# Altium schematic symbol library TitansLib.SchLib: 462 symbols (part 8 of 24)
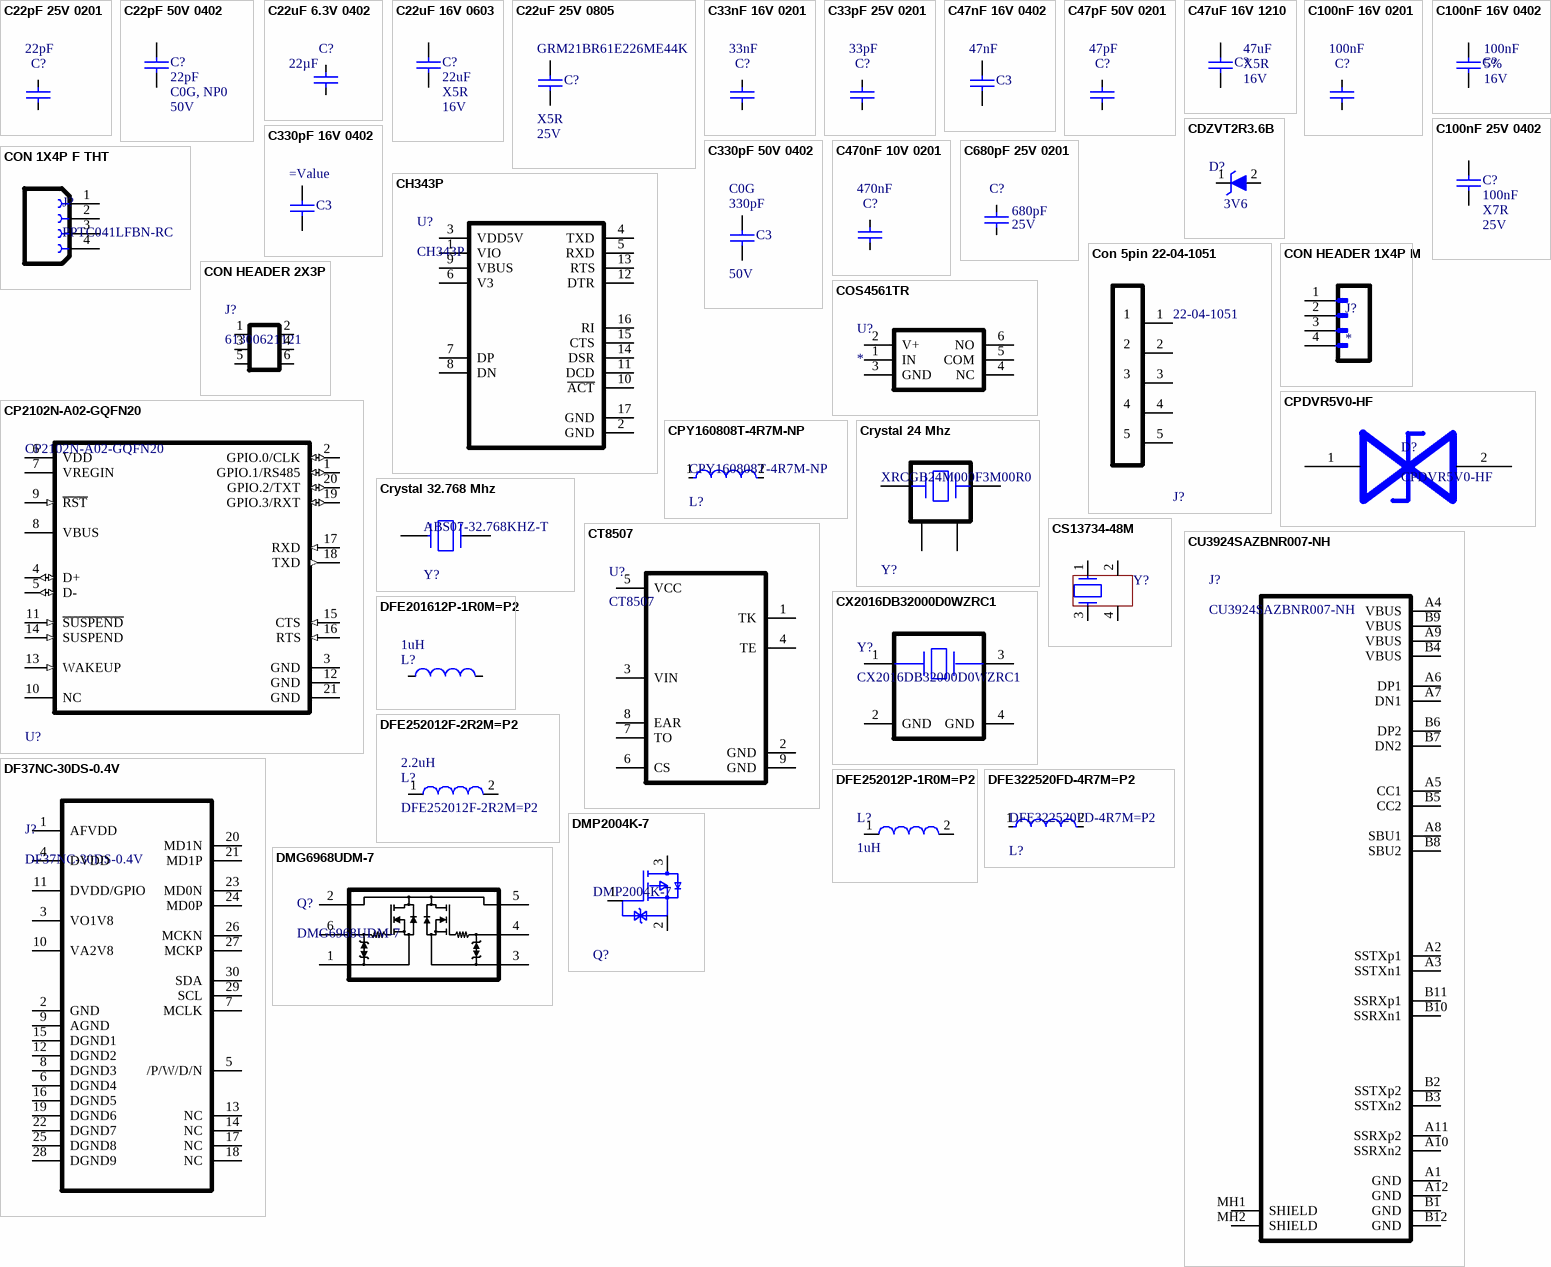
[diagram p24: symbols C22pF 25V 0201 to DMP2004K-7]

## Con 5pin 22-04-1051
designator J?, comment 22-04-1051
Pin Header, Wire-to-Board, 2.5 mm, 1 Rows, 5 Contacts, Through Hole Straight, KK 5045 Series; Manufacturer Lifecycle Status: ACTIVE; NexarPartId: 247488; Manufacturer: Molex; Insulation Resistance: 1GΩ; Current Rating: 3A; Pitch: 2.5mm; Glow Wire Compliant: Non-compliant; Plating: Tin; Number of Circuits: 5; Voltage Rating: 250V; Contact Resistance: 20mΩ; Gender: Male; Connector Type: Male Pin; Max Voltage Rating (DC): 250.25kV; Dielectric Material: Polyamide; Operating Force: 58.84N; Plating Thickness: 5.08µm; Termination: Solder; Number of Rows: 1; REACH SVHC: Unknown; Number of Pins: 5; Length: 12mm; Schedule B: 8536694040|8536694040|8536694040|8536694040|8536694040|8536694040|8536694040|8536694040|8536694040|8536694040|8536694040|8536694040|8536694040|8536694040|8536694040|8536694040|8536694040|8536694040|8536694040|8536694040|8536694040|8536694040|8536694040|85; Min Operating Temperature: -40°C; RoHS: Compliant; Radiation Hardening: No; Contact Mating Length: 7.493mm; Packaging: Bulk; Halogen Free: Low Halogen; Housing Color: Natural; Max Operating Temperature: 105°C; Housing Material: Nylon; Lead Pitch: 2.5mm; Max Voltage Rating (AC): 250V; Number of Positions: 5; Material: Nylon; Contact Plating: Tin; Depth: 4.9mm; Flammability Rating: UL94 V-0; Lead Free: Lead Free; Fastening Type: Friction; Color: Natural; Orientation: Vertical; Lifecycle Status: Production; Number of Contacts: 5; Voltage Rating (DC): 250V; Voltage Rating (AC): 250V; Country of Origin: TW; Contact Material: Brass; Mount: Through Hole; Supplier: Arrow Electronics; Supplier Part Number: 0022041051; Manufacturer Part Number: 22-04-1051; Category: Headers and Wire Housings; Stock: 12494; Pricing: 1=1,0245, 10=0,8607, 100=0,7266, 500=0,6432, 1000=0,6067, 8000=0,5196 (USD); China RoHS: Compliant; Export Control Classification Number (ECCN) Code: EAR99; Harmonized Tariff Schedule (HTS) Code: 8536.69.40.40; Introduction Date: 1994-12-01; Mounting Technology: Through Hole; Pins: 5; Terminal Pitch: 2.4892mm; ComponentLink1URL: https://datasheet.octopart.com:443/22041051-Molex-datasheet-152766370.pdf?src-supplier=IHS; ComponentLink1Description: https://datasheet.octopart.com:443/22041051-Molex-datasheet-152766370.pdf?src-supplier=IHS; ComponentLink2URL: https://datasheet.octopart.com:443/22-04-1051-Molex-datasheet-126588.pdf?src-supplier=Factory+Futures; ComponentLink2Description: https://datasheet.octopart.com:443/22-04-1051-Molex-datasheet-126588.pdf?src-supplier=Factory+Futures; ComponentLink3URL: https://sigma.octopart.com:443/16295337/technical_drawing/Molex-22-04-1051.pdf?src-supplier=Molex; ComponentLink3Description: https://sigma.octopart.com:443/16295337/technical_drawing/Molex-22-04-1051.pdf?src-supplier=Molex; ComponentLink4URL: https://datasheet.octopart.com:443/22-04-1051-Molex-datasheet-13787172.pdf?src-supplier=Molex; ComponentLink4Description: https://datasheet.octopart.com:443/22-04-1051-Molex-datasheet-13787172.pdf?src-supplier=Molex; ComponentLink5URL: https://datasheet.octopart.com:443/22-04-1051-Molex-datasheet-193084691.pdf?src-supplier=JRH+Electronics; ComponentLink5Description: https://datasheet.octopart.com:443/22-04-1051-Molex-datasheet-193084691.pdf?src-supplier=JRH+Electronics; ComponentLink6URL: https://datasheet.octopart.com:443/22-04-1051-Molex-datasheet-154746825.pdf?src-supplier=Master+Electronics; ComponentLink6Description: https://datasheet.octopart.com:443/22-04-1051-Molex-datasheet-154746825.pdf?src-supplier=Master+Electronics; ComponentLink7URL: https://datasheet.octopart.com:443/22-04-1051-Molex-datasheet-23708870.pdf?src-supplier=Newark; ComponentLink7Description: https://datasheet.octopart.com:443/22-04-1051-Molex-datasheet-23708870.pdf?src-supplier=Newark; ComponentLink8URL: https://datasheet.octopart.com:443/22-04-1051-Molex-datasheet-82994734.pdf?src-supplier=Newark; ComponentLink8Description: https://datasheet.octopart.com:443/22-04-1051-Molex-datasheet-82994734.pdf?src-supplier=Newark; ComponentLink9URL: https://datasheet.octopart.com:443/22-04-1051-Molex-datasheet-140180718.pdf?src-supplier=RS+(Formerly+Allied+Electronics); ComponentLink9Description: https://datasheet.octopart.com:443/22-04-1051-Molex-datasheet-140180718.pdf?src-supplier=RS+(Formerly+Allied+Electronics); ComponentLink10URL: https://datasheet.octopart.com:443/22-04-1051-Molex-datasheet-120144843.pdf?src-supplier=RS+(Formerly+Allied+Electronics); ComponentLink10Description: https://datasheet.octopart.com:443/22-04-1051-Molex-datasheet-120144843.pdf?src-supplier=RS+(Formerly+Allied+Electronics); ComponentLink11URL: https://datasheet.octopart.com:443/22-04-1051-Molex-datasheet-44401622.pdf?src-supplier=Electro+Sonic; ComponentLink11Description: https://datasheet.octopart.com:443/22-04-1051-Molex-datasheet-44401622.pdf?src-supplier=Electro+Sonic; ComponentLink12URL: https://datasheet.octopart.com:443/22-04-1051-Molex-datasheet-37168631.pdf?src-supplier=Electro+Sonic; ComponentLink12Description: https://datasheet.octopart.com:443/22-04-1051-Molex-datasheet-37168631.pdf?src-supplier=Electro+Sonic; ComponentLink13URL: https://datasheet.octopart.com:443/22-04-1051-Molex-datasheet-15766282.pdf?src-supplier=Farnell; ComponentLink13Description: https://datasheet.octopart.com:443/22-04-1051-Molex-datasheet-15766282.pdf?src-supplier=Farnell; ComponentLink14URL: https://datasheet.octopart.com:443/22-04-1051-Molex-datasheet-13550724.pdf?src-supplier=Farnell; ComponentLink14Description: https://datasheet.octopart.com:443/22-04-1051-Molex-datasheet-13550724.pdf?src-supplier=Farnell; ComponentLink15URL: https://datasheet.octopart.com:443/22-04-1051-Molex-datasheet-11031693.pdf?src-supplier=Farnell; ComponentLink15Description: https://datasheet.octopart.com:443/22-04-1051-Molex-datasheet-11031693.pdf?src-supplier=Farnell; ComponentLink16URL: https://datasheet.octopart.com:443/22-04-1051-Molex-datasheet-561885.pdf?src-supplier=Farnell; ComponentLink16Description: https://datasheet.octopart.com:443/22-04-1051-Molex-datasheet-561885.pdf?src-supplier=Farnell; ComponentLink17URL: http://sigma.octopart.com:80/16295340/rohs_statement/Molex-22-04-1051.pdf?src-supplier=Compliance+Statements; ComponentLink17Description: http://sigma.octopart.com:80/16295340/rohs_statement/Molex-22-04-1051.pdf?src-supplier=Compliance+Statements; ComponentLink18URL: http://sigma.octopart.com:80/reach_statement/Molex-company-74.pdf?src-supplier=Compliance+Statements; ComponentLink18Description: http://sigma.octopart.com:80/reach_statement/Molex-company-74.pdf?src-supplier=Compliance+Statements; ComponentLink19URL: http://sigma.octopart.com:80/rohs_statement/Molex-company-73.pdf?src-supplier=Compliance+Statements; ComponentLink19Description: http://sigma.octopart.com:80/rohs_statement/Molex-company-73.pdf?src-supplier=Compliance+Statements; ComponentLink20URL: http://sigma.octopart.com:80/conflict_mineral_statement/Molex-company-72.pdf?src-supplier=Compliance+Statements; ComponentLink20Description: http://sigma.octopart.com:80/conflict_mineral_statement/Molex-company-72.pdf?src-supplier=Compliance+Statements; Supplier 1: DigiKey; Supplier Part Number 1: WM18788-ND; Supplier 2: Mouser; Supplier Part Number 2: 538-22-04-1051
footprint FP-22-04-1051-MFG
pins: 1, 2, 3, 4, 5

## CON HEADER 1X4P M
designator J?
Connector Header Through Hole 4 position 0.100 (2.54mm); MF: WÃ¼rth Elektronik; MP: 61300411121; SnapEDA_Link: https://www.snapeda.com/parts/61300411121/W%25C3%25BCrth+Elektronik+Midcom/view-part/?ref=snap; Package: None; Value: *; Check_prices: https://www.snapeda.com/parts/61300411121/W%25C3%25BCrth+Elektronik+Midcom/view-part/?ref=eda
footprint WURTH_61300411121
pins: 1, 2, 3, 4

## CON HEADER 2X3P
designator J?, comment 61300621121
Header, 2.54Mm, Pin, Tht, Vertical, 6Way; |Würth Elektronik 61300621121; Manufacturer: Wurth Elektronik; Manufacturer Lifecycle Status: ACTIVE; MF: {'manufacturer': u'Wurth Elektronik'}; Connector Type: Male Pin; Contact Resistance: 20mΩ; Current Rating: 3A; Gender: Male; Insulation Resistance: 1GΩ; Number of Contacts: 6; Operating Supply Voltage: 250V; YEOL: 1 = Estimated lifetime > 10 years; Package: None; Price: None; Value: *; MP: 61300621121; Availability: Unavailable; Supplier: Newark; Supplier Part Number: 61300621121; Manufacturer Part Number: 61300621121; RoHS: Compliant; Category: Headers and Wire Housings; Stock: 16511; Pricing: 1=0,641, 10=0,56, 25=0,533, 50=0,498, 100=0,478, 500=0,45, 1000=0,418, 5000=0,385 (USD); Color: Black; Contact Material: Gold; Contact Mating Length: 5.9944mm; Contact Plating: Gold; Height: 8.89mm; Lead Pitch: 2.54mm; Length: 7.62mm; Lifecycle Status: Production; Max Operating Temperature: 105°C; Min Operating Temperature: -40°C; Mounting Technology: Through Hole; Pins: 6; Number of Positions: 6; Number of Rows: 2; Orientation: Vertical; Packaging: Bulk; Pitch: 2.54mm; Row Spacing: 2.54mm; Termination: Solder; Voltage Rating: 250V; ComponentLink1URL: https://datasheet.octopart.com:443/61300621121-W%C3%BCrth-Elektronik-datasheet-149524079.pdf?src-supplier=Wurth+Elektronik; ComponentLink1Description: https://datasheet.octopart.com:443/61300621121-W%C3%BCrth-Elektronik-datasheet-149524079.pdf?src-supplier=Wurth+Elektronik; ComponentLink2URL: https://datasheet.octopart.com:443/61300621121-W%C3%BCrth-Elektronik-datasheet-45185731.pdf?src-supplier=HQonline; ComponentLink2Description: https://datasheet.octopart.com:443/61300621121-W%C3%BCrth-Elektronik-datasheet-45185731.pdf?src-supplier=HQonline; ComponentLink3URL: https://datasheet.octopart.com:443/61300621121-W%C3%BCrth-Elektronik-datasheet-10693404.pdf?src-supplier=Newark; ComponentLink3Description: https://datasheet.octopart.com:443/61300621121-W%C3%BCrth-Elektronik-datasheet-10693404.pdf?src-supplier=Newark
footprint 61300621121
pins: 1, 2, 3, 4, 5, 6

## COS4561TR
designator U?
3V~16V 1 3.6Ω SOT-23-6 Analog Switches, Multiplexers, Demultiplexers RoHS; Manufacturer 1: Cosine; Manufacturer Part Number 1: COS4561TR; Datasheet Link: https://www.lcsc.com/datasheet/C3035952.pdf; Height: 1.45mm; Supplier Part Number 1: C3035952; Supplier Link 1: https://www.lcsc.com/product-detail/C3035952.html?s_z=n_COS4561; Supplier Unit Price 1: 0.5675
footprint SOT95P280X145-6N
pins: 1 IN, 2 V+, 3 GND, 4 NC, 5 COM, 6 NO

## CP2102N-A02-GQFN20
designator U?
USB Bus Controller, CMOS; Manufacturer: Silicon Labs; Manufacturer Part Number: CP2102N-A02-GQFN20; Supplier: Mouser; Supplier Part Number: 634-CP2102NA02GQFN20; RoHS: Yes; Category: USB Interface ICs; Stock: 69421; Pricing: 1=3.96, 10=3.54, 50=2.82, 100=2.69, 1000=2.16, 10000=2.08 (USD); ComponentLink1URL: https://datasheet.ciiva.com:443/pdfs/VipMasterIC/IC/SILC/SILC-S-A0007770867/SILC-S-A0007770867-1.pdf?src-supplier=IHS+Markit; ComponentLink1Description: https://datasheet.ciiva.com:443/pdfs/VipMasterIC/IC/SILC/SILC-S-A0007770867/SILC-S-A0007770867-1.pdf?src-supplier=IHS+Markit; ComponentLink2URL: http://www.farnell.com/datasheets/2786351.pdf?src-supplier=Farnell; ComponentLink2Description: http://www.farnell.com/datasheets/2786351.pdf?src-supplier=Farnell; ComponentLink3URL: https://www.silabs.com/documents/public/data-sheets/cp2102n-datasheet.pdf?src-supplier=Digikey; ComponentLink3Description: https://www.silabs.com/documents/public/data-sheets/cp2102n-datasheet.pdf?src-supplier=Digikey; ComponentLink4URL: http://www.farnell.com/datasheets/2786351.pdf?src-supplier=Newark; ComponentLink4Description: http://www.farnell.com/datasheets/2786351.pdf?src-supplier=Newark
footprint CP2102N-A02-GQFN20-MFG
pins: 1 GPIO.1/RS485 (io), 2 GPIO.0/CLK (io), 3 GND (power), 4 D+ (io), 5 D- (io), 6 VDD (power), 7 VREGIN (power), 8 VBUS (power), 9 ~{RST} (in), 10 NC, 11 ~{SUSPEND} (in), 12 GND (power), 13 WAKEUP (in), 14 SUSPEND (in), 15 CTS (in), 16 RTS (in), 17 RXD (in), 18 TXD (out), 19 GPIO.3/RXT (io), 20 GPIO.2/TXT (io), 21 GND (power)

## CPDVR5V0-HF
designator D?
footprint CPDVR5V0-HF (Chip Diode, 2-Leads, Body 1,00x0,60mm, IPC Medium Density)
pins: 1, 2

## CPY160808T-4R7M-NP
designator L?
800mA 4.7uH 250mΩ Multilayer inductor ±20% 0603 Fixed Inductors RoHS; Manufacturer: Chilisin; Supplier: LCSC; Supplier Part Number: C295681; Manufacturer Part Number: CPY160808T-4R7M-NP; RoHS: Yes; Category: Fixed Inductors; Supplier Unit Price 1: 0.0194; ComponentLink1URL: https://datasheet.ciiva.com:443/pdfs/VipMasterIC/IC/MURE/MURE-S-A0006520090/MURE-S-A0006740961-1.pdf?src-supplier=IHS+Markit; ComponentLink1Description: https://datasheet.ciiva.com:443/pdfs/VipMasterIC/IC/MURE/MURE-S-A0006520090/MURE-S-A0006740961-1.pdf?src-supplier=IHS+Markit
footprint RES0603-M (Chip Resistor, 2-Leads, Body 1.60x0.80mm, IPC Medium Density)
pins: 1, 2

## Crystal 24 Mhz
designator Y?, comment XRCGB24M000F3M00R0
Crystal, Quartz, 24 MHz, SMD, 2mm x 1.6mm x 0.65mm, 40 ppm, 6 pF, 30 ppm, XRCGB_F_M; Manufacturer: Murata; ESR (Equivalent Series Resistance): 150R; Operating Frequency: 24 MHz; Tolerance: 30ppm; Frequency: 24MHz; Load Capacitance: 6pF; Frequency Stability: 40ppm; ESR: 150Ω; Length: 2mm; Height: 0.028inch; Lead Free: Lead Free; Min Operating Temperature: -30°C; REACH SVHC: No SVHC; RoHS Compliant: Yes; Series Resistance: 150R; Mount: Surface Mount; Packaging: Tape and Reel; Termination: SMD/SMT; Case/Package: SMD/SMT; Max Operating Temperature: 85°C; Width: 1.6mm; Number of Pins: 4; Package Quantity: 1; Depth: 1.6mm; Frequency Tolerance: 30ppm; Series: XRCGB; Supplier: Future Electronics; Supplier Part Number: XRCGB24M000F3M00R0; Manufacturer Part Number: XRCGB24M000F3M00R0; RoHS: Compliant; Category: Crystals; Stock: 3000; Pricing: 3000=0,132 (USD); Country of Origin: Japan; Export Control Classification Number (ECCN) Code: EAR99; Harmonized Tariff Schedule (HTS) Code: 8541.60.00.60; Introduction Date: 2010-07-12; Lifecycle Status: Production; Mounting Technology: Surface Mount; Pins: 4; Schedule B: 8541600060, 8541600060|8541600060, 8541600060|8541600060|8541600060, 8541600060|8541600060|8541600060|8541600060; ComponentLink1URL: https://datasheet.octopart.com:443/XRCGB24M000F3M00R0-Murata-datasheet-180814478.pdf?src-supplier=IHS; ComponentLink1Description: https://datasheet.octopart.com:443/XRCGB24M000F3M00R0-Murata-datasheet-180814478.pdf?src-supplier=IHS; ComponentLink2URL: https://datasheet.octopart.com:443/XRCGB24M000F3M00R0-Murata-datasheet-41472940.pdf?src-supplier=ODG+(Origin+Data+Global); ComponentLink2Description: https://datasheet.octopart.com:443/XRCGB24M000F3M00R0-Murata-datasheet-41472940.pdf?src-supplier=ODG+(Origin+Data+Global); ComponentLink3URL: https://datasheet.octopart.com:443/XRCGB24M000F3M00R0-Murata-datasheet-21396568.pdf?src-supplier=Farnell; ComponentLink3Description: https://datasheet.octopart.com:443/XRCGB24M000F3M00R0-Murata-datasheet-21396568.pdf?src-supplier=Farnell; ComponentLink4URL: https://datasheet.octopart.com:443/XRCGB24M000F3M00R0-Murata-datasheet-12522689.pdf?src-supplier=Farnell; ComponentLink4Description: https://datasheet.octopart.com:443/XRCGB24M000F3M00R0-Murata-datasheet-12522689.pdf?src-supplier=Farnell; ComponentLink5URL: https://datasheet.octopart.com:443/XRCGB24M000F3M00R0-Murata-datasheet-10026476.pdf?src-supplier=Farnell; ComponentLink5Description: https://datasheet.octopart.com:443/XRCGB24M000F3M00R0-Murata-datasheet-10026476.pdf?src-supplier=Farnell; ComponentLink6URL: https://datasheet.octopart.com:443/XRCGB24M000F3M00R0-Murata-datasheet-10025967.pdf?src-supplier=Future+Electronics; ComponentLink6Description: https://datasheet.octopart.com:443/XRCGB24M000F3M00R0-Murata-datasheet-10025967.pdf?src-supplier=Future+Electronics; ComponentLink7URL: https://datasheet.octopart.com:443/XRCGB24M000F3M00R0-Murata-datasheet-127110390.pdf?src-supplier=Future+Electronics; ComponentLink7Description: https://datasheet.octopart.com:443/XRCGB24M000F3M00R0-Murata-datasheet-127110390.pdf?src-supplier=Future+Electronics; ComponentLink8URL: https://datasheet.octopart.com:443/XRCGB24M000F3M00R0-Murata-datasheet-138713235.pdf?src-supplier=Ciiva; ComponentLink8Description: https://datasheet.octopart.com:443/XRCGB24M000F3M00R0-Murata-datasheet-138713235.pdf?src-supplier=Ciiva; ComponentLink9URL: https://datasheet.octopart.com:443/XRCGB24M000F3M00R0-Murata-datasheet-138710241.pdf?src-supplier=Ciiva; ComponentLink9Description: https://datasheet.octopart.com:443/XRCGB24M000F3M00R0-Murata-datasheet-138710241.pdf?src-supplier=Ciiva; ComponentLink10URL: http://sigma.octopart.com:80/reach_statement/Murata-company-16.pdf?src-supplier=Compliance+Statements; ComponentLink10Description: http://sigma.octopart.com:80/reach_statement/Murata-company-16.pdf?src-supplier=Compliance+Statements; Supplier 1: DigiKey; Supplier Part Number 1: 490-5576-1-ND; Supplier 2: DigiKey; Supplier Part Number 2: 490-5576-6-ND; Supplier 3: Mouser; Supplier Part Number 3: 81-XRCGB24M000F3M0R0
footprint FP-XRCGB_F_N-MFG
pins: 1 1 Input/Output, 2 GND, 3 2 Input/Output, 4 GND

## Crystal 32.768 Mhz
designator Y?, comment ABS07-32.768KHZ-T
Crystal 0.032768MHz ±20ppm (Tol) 12.5pF Flexural 70000Ohm 2-Pin CSMD T/R; Manufacturer: Abracon; ESR (Equivalent Series Resistance): 70kR; Frequency Stability: 144ppm; ESR: 70kΩ; Radiation Hardening: No; Frequency: 32.768kHz; Length: 3.2mm; Max Operating Temperature: 85°C; Number of Pins: 2; Series: ABS07; Min Operating Temperature: -40°C; Frequency Tolerance: 20ppm; Packaging: Tape and Reel; Height: 0.9mm; Width: 1.5mm; Depth: 1.5mm; Load Capacitance: 12.5pF; RoHS Compliant: Yes; Tolerance: 20ppm; Termination: SMD/SMT; Lead Free: Lead Free; Series Resistance: 70kR; REACH SVHC: No SVHC; Case/Package: CSMD; Operating Frequency: 32.768 kHz; Package Quantity: 3000; Supplier: Arrow Electronics; Supplier Part Number: ABS07-32.768KHZ-T; Manufacturer Part Number: ABS07-32.768KHZ-T; RoHS: Compliant; Category: Crystals; Stock: 717000; Pricing: 3000=0,3724, 6000=0,357, 9000=0,3483, 15000=0,3376, 21000=0,3308, 30000=0,3237 (USD); Value: 12.5pF; China RoHS: Compliant; Country of Origin: Mainland China; Export Control Classification Number (ECCN) Code: EAR99; Harmonized Tariff Schedule (HTS) Code: 8541.60.00.10; Introduction Date: 2007-01-08; Lifecycle Status: Production; Mounting Technology: Surface Mount; Pins: 2; Schedule B: 8541600025, 8541600025|8541600025, 8541600025|8541600025|8541600025, 8541600025|8541600025|8541600025|8541600025; ComponentLink1URL: https://datasheet.octopart.com:443/ABS07-32.768KHZ-T-Abracon-datasheet-166693031.pdf?src-supplier=JRH+Electronics; ComponentLink1Description: https://datasheet.octopart.com:443/ABS07-32.768KHZ-T-Abracon-datasheet-166693031.pdf?src-supplier=JRH+Electronics; ComponentLink2URL: https://datasheet.octopart.com:443/ABS07-32.768KHZ-T-Abracon-datasheet-103422647.pdf?src-supplier=JRH+Electronics; ComponentLink2Description: https://datasheet.octopart.com:443/ABS07-32.768KHZ-T-Abracon-datasheet-103422647.pdf?src-supplier=JRH+Electronics; ComponentLink3URL: https://datasheet.octopart.com:443/ABS07-32.768KHZ-T-Abracon-datasheet-12512028.pdf?src-supplier=Upverter; ComponentLink3Description: https://datasheet.octopart.com:443/ABS07-32.768KHZ-T-Abracon-datasheet-12512028.pdf?src-supplier=Upverter; ComponentLink4URL: https://datasheet.octopart.com:443/ABS07-32.768KHZ-T-Abracon-datasheet-10031075.pdf?src-supplier=Upverter; ComponentLink4Description: https://datasheet.octopart.com:443/ABS07-32.768KHZ-T-Abracon-datasheet-10031075.pdf?src-supplier=Upverter; ComponentLink5URL: https://datasheet.octopart.com:443/ABS07-32.768KHZ-T-Abracon-datasheet-8326266.pdf?src-supplier=Upverter; ComponentLink5Description: https://datasheet.octopart.com:443/ABS07-32.768KHZ-T-Abracon-datasheet-8326266.pdf?src-supplier=Upverter; ComponentLink6URL: https://datasheet.octopart.com:443/ABS07-32.768KHZ-T-Abracon-datasheet-121082.pdf?src-supplier=Upverter; ComponentLink6Description: https://datasheet.octopart.com:443/ABS07-32.768KHZ-T-Abracon-datasheet-121082.pdf?src-supplier=Upverter; ComponentLink7URL: https://datasheet.octopart.com:443/ABS07-32.768KHZ-T-Abracon-datasheet-41191559.pdf?src-supplier=element14+APAC; ComponentLink7Description: https://datasheet.octopart.com:443/ABS07-32.768KHZ-T-Abracon-datasheet-41191559.pdf?src-supplier=element14+APAC; ComponentLink8URL: https://datasheet.octopart.com:443/ABS07-32.768KHZ-T-Abracon-datasheet-15206620.pdf?src-supplier=Newark; ComponentLink8Description: https://datasheet.octopart.com:443/ABS07-32.768KHZ-T-Abracon-datasheet-15206620.pdf?src-supplier=Newark; ComponentLink9URL: https://datasheet.octopart.com:443/ABS07-32.768KHZ-T-Abracon-datasheet-37124839.pdf?src-supplier=Farnell; ComponentLink9Description: https://datasheet.octopart.com:443/ABS07-32.768KHZ-T-Abracon-datasheet-37124839.pdf?src-supplier=Farnell; ComponentLink10URL: https://datasheet.octopart.com:443/ABS07-32.768KHZ-T-Abracon-datasheet-128558976.pdf?src-supplier=X-ON; ComponentLink10Description: https://datasheet.octopart.com:443/ABS07-32.768KHZ-T-Abracon-datasheet-128558976.pdf?src-supplier=X-ON; ComponentLink11URL: https://datasheet.octopart.com:443/ABS07-32.768KHZ-T-Abracon-datasheet-49826663.pdf?src-supplier=TME; ComponentLink11Description: https://datasheet.octopart.com:443/ABS07-32.768KHZ-T-Abracon-datasheet-49826663.pdf?src-supplier=TME; ComponentLink12URL: https://datasheet.octopart.com:443/ABS07-32.768KHZ-T-Abracon-datasheet-15994676.pdf?src-supplier=TME; ComponentLink12Description: https://datasheet.octopart.com:443/ABS07-32.768KHZ-T-Abracon-datasheet-15994676.pdf?src-supplier=TME; ComponentLink13URL: http://sigma.octopart.com:80/conflict_mineral_statement/Abracon-company-27.pdf?src-supplier=Compliance+Statements; ComponentLink13Description: http://sigma.octopart.com:80/conflict_mineral_statement/Abracon-company-27.pdf?src-supplier=Compliance+Statements; Supplier 1: DigiKey; Supplier Part Number 1: 535-9542-6-ND; Supplier 2: DigiKey; Supplier Part Number 2: 535-9542-1-ND; Supplier 3: Mouser; Supplier Part Number 3: 815-ABS07-32.768KHZT
footprint FP-ABS07-MFG
pins: 1, 2

## CS13734-48M
designator Y?  (value not drawn)
Crystal 48.0000MHZ 7PF SMD; Manufacturer: NDK; ComponentLink1URL: http://tunmcdsvn.tun.st.com/Component_Documentation_Library/Trunk/Crystal_Oscillator/NDK_NX1612SA_Series; Supplier: DigiKey; Supplier Part Number: 644-CS13734-48MCT-ND; Manufacturer Part Number: CS13734-48M; Category: Crystals; Stock: 452; Pricing: 1=0.89, 10=0.777, 25=0.7344, 50=0.7042, 100=0.675, 250=0.63836, 500=0.61196, 1000=0.58665 (USD); Supplier 1: DigiKey; Supplier Part Number 1: 644-CS13734-48MCT-ND; Supplier 2: DigiKey; Supplier Part Number 2: 644-CS13734-48MTR-ND
footprint CRY_NX1612SA_4P (MCD-02262)
pins: 1, 2, 3, 4

## CT8507
designator U?
Capacitive touch sensor; Manufacturer Part Number: CT8507
footprint DFN50P200X200X80_HS-9N (DFN, 8-Leads, Body 2.00x2.00mm, Pitch 0.50mm, Thermal Pad 0.90x1.60mm, IPC Medium Density)
pins: 1 TK, 2 GND, 3 VIN, 4 TE, 5 VCC, 6 CS, 7 TO, 8 EAR, 9 GND

## CU3924SAZBNR007-NH
designator J?
Usb 3.1 Type-c. Receptaclemid-mo; Manufacturer: CviLux; Supplier: Digikey; Supplier Part Number: 2987-CU3924SAZBNR007-NHCT-ND; Manufacturer Part Number: CU3924SAZBNR007-NH; RoHS: No; Stock: 2192; Pricing: 1=2.19, 10=1.857, 25=1.7408, 50=1.6576, 100=1.5784, 250=1.47952 (USD)
footprint CU3924SAZBNR007-NH
pins: A1 GND, A2 SSTXp1, A3 SSTXn1, A4 VBUS, A5 CC1, A6 DP1, A7 DN1, A8 SBU1, A9 VBUS, A10 SSRXn2, A11 SSRXp2, A12 GND, B1 GND, B2 SSTXp2, B3 SSTXn2, B4 VBUS, B5 CC2, B6 DP2, B7 DN2, B8 SBU2, B9 VBUS, B10 SSRXn1, B11 SSRXp1, B12 GND, MH1 SHIELD, MH2 SHIELD

## CX2016DB32000D0WZRC1
designator Y?
Crystal, Quartz, 32 MHz, SMD, 2mm x 1.6mm x 0.4mm, 8 pf, CX2016DB; Manufacturer: KYOCERA AVX; ESR (Equivalent Series Resistance): 50Ω; Frequency: 32MHz; Frequency Stability: 40ppm; Frequency Tolerance: 0.004%; Load Capacitance: 8pF; Supplier: DigiKey; Supplier Part Number: 478-CX2016DB32000D0WZRC1CT-ND; Manufacturer Part Number: CX2016DB32000D0WZRC1; RoHS: Compliant; Category: Crystals; Stock: 12728; Pricing: 1=0.69, 10=0.596, 25=0.5636, 50=0.5404, 100=0.518, 250=0.48984, 500=0.4696, 1000=0.45016 (USD); Case/Package: SMD/SMT; Country of Origin: Japan; Height: 457.2µm; Introduction Date: 2023-04-06; Length: 2.0066mm; Lifecycle Status: Production; Max Operating Temperature: 75°C; Min Operating Temperature: -20°C; Mounting Technology: Surface Mount; Ratings: AEC-Q200; REACH SVHC: Yes; Schedule B: 8541600080; ESR: 50Ω; Width: 1.6002mm; ComponentLink1URL: https://datasheet.octopart.com:443/CX2016DB32000D0WZRC1-KYOCERA-AVX-datasheet-165896878.pdf?src-supplier=Future+Electronics; ComponentLink1Description: https://datasheet.octopart.com:443/CX2016DB32000D0WZRC1-KYOCERA-AVX-datasheet-165896878.pdf?src-supplier=Future+Electronics; ComponentLink2URL: http://sigma.octopart.com:80/conflict_mineral_statement/AVX-company-34.pdf?src-supplier=Compliance+Statements; ComponentLink2Description: http://sigma.octopart.com:80/conflict_mineral_statement/AVX-company-34.pdf?src-supplier=Compliance+Statements; ComponentLink3URL: http://sigma.octopart.com:80/reach_statement/AVX-company-19.pdf?src-supplier=Compliance+Statements; ComponentLink3Description: http://sigma.octopart.com:80/reach_statement/AVX-company-19.pdf?src-supplier=Compliance+Statements
footprint OSC_CX2016DB32000D0WZRC1 (Footprint not found)
pins: 1, 2 GND (power), 3, 4 GND (power)

## DF37NC-30DS-0.4V
designator J?
Board Connector, 30 Contact(s), 2 Row(s), Female, Straight, 0.016 inch Pitch, Surface Mount Terminal, Locking, Black Insulator, Receptacle; Manufacturer: Hirose; Manufacturer Part Number: DF37NC-30DS-0.4V(51); Manufacturer Series: DF37; Option: General Purpose; Contact Pattern: RECTANGULAR; Contact Resistance: 100mR; Dielectric Withstanding Voltage (AC): 100V; Durability: 10Cycles; Filter Feature: No; Insulation Resistance: 50MR; Mating Information: MULTIPLE MATING PARTS AVAILABLE; Number Of Connectors: 1; Number Of PCB Rows: 2; Polarization Key: POLARIZED HOUSING; Rated Current (Signal): 300mA; Number of Contacts: 30; PCB Contact Row Spacing: 2.6416mm; Reference Standard: UL; Reliability: COMMERCIAL; Supplier: Mouser; Supplier Part Number: 798-DF37NC30DS04V51; RoHS: Yes; Category: Connectors; Stock: 10367; Pricing: 1=0.98, 10=0.834, 50=0.744, 100=0.709, 1000=0.602, 10000=0.567 (USD); Mounting Technology: Board; Contact Material: Bronze; Contact Finish - Mating: NOT SPECIFIED; Insulation Color: Black; Insulation Material: Polymer; Min Operating Temperature: -35°C; Max Operating Temperature: 85°C; Connector Type: BOARD CONNECTOR; Body/Shell Style: RECEPTACLE; Contact Gender: Female; Mixed Contacts: No; Mounting Style: STRAIGHT; Number of Rows Loaded: 2; PCB Contact Pattern: RECTANGULAR; Termination: SMD/SMT; Mating Contact Pitch: 0.016inch; Mounting Option 1: LOCKING; Terminal Pitch: 0.4mm; Flammability Rating: UL94 V-0; RoHS Compliant: Yes; DIN Conformance: No; IEC Conformance: No; MIL Conformance: No; ComponentLink1URL: https://datasheet.ciiva.com:443/pdfs/VipMasterIC/IC/HIRO/HIRO-S-A0007918127/HIRO-S-A0008980662-1.pdf?src-supplier=IHS+Markit; ComponentLink1Description: https://datasheet.ciiva.com:443/pdfs/VipMasterIC/IC/HIRO/HIRO-S-A0007918127/HIRO-S-A0008980662-1.pdf?src-supplier=IHS+Markit; ComponentLink2URL: http://www.mouser.com/ds/2/185/DF37_catalog-939311.pdf?src-supplier=Mouser; ComponentLink2Description: http://www.mouser.com/ds/2/185/DF37_catalog-939311.pdf?src-supplier=Mouser; ComponentLink3URL: https://www.hirose.com/product/document?clcode=CL0684-3008-1-53&amp;productname=DF37B-20DP-0.4V(53)&amp;series=DF37&amp;documenttype=Catalog&amp;lang=en&amp;documentid=D49052_en&src-supplier=Digikey; ComponentLink3Description: https://www.hirose.com/product/document?clcode=CL0684-3008-1-53&amp;productname=DF37B-20DP-0.4V(53)&amp;series=DF37&amp;documenttype=Catalog&amp;lang=en&amp;documentid=D49052_en&src-supplier=Digikey; ComponentLink4URL: https://www.hirose.com/product/en/download_file/key_name/DF37NC-30DS-0.4V%2851%29/category/Specification%20Sheet/doc_file_id/46745/?file_category_id=9&item_id=06843313551&is_series=&src-supplier=Digikey; ComponentLink4Description: https://www.hirose.com/product/en/download_file/key_name/DF37NC-30DS-0.4V%2851%29/category/Specification%20Sheet/doc_file_id/46745/?file_category_id=9&item_id=06843313551&is_series=&src-supplier=Digikey; ComponentLink5URL: https://datasheet.octopart.com/DF37NC-30DS-0.4V%2851%29-Hirose-datasheet-136945248.pdf?src-supplier=LKR; ComponentLink5Description: https://datasheet.octopart.com/DF37NC-30DS-0.4V%2851%29-Hirose-datasheet-136945248.pdf?src-supplier=LKR; Supplier 1: Mouser; Supplier Part Number 1: 798-DF37NC30DS04V51; Supplier 2: Digikey; Supplier Part Number 2: H11856CT-ND
footprint DF37NC-30DS-0.4V
pins: 1 AFVDD, 2 GND, 3 VO1V8, 4 DVDD, 5 /P/W/D/N, 6 DGND4, 7 MCLK, 8 DGND3, 9 AGND, 10 VA2V8, 11 DVDD/GPIO, 12 DGND2, 13 NC, 14 NC, 15 DGND1, 16 DGND5, 17 NC, 18 NC, 19 DGND6, 20 MD1N, 21 MD1P, 22 DGND7, 23 MD0N, 24 MD0P, 25 DGND8, 26 MCKN, 27 MCKP, 28 DGND9, 29 SCL, 30 SDA

## DFE201612P-1R0M=P2
designator L?  value 1uH  (hidden comment: DFE201612P-1R0M=P2)
Inductor Power Shielded Wirewound 1uH 20% 1MHz Metal 2.7A 0.054Ohm DCR 0806 T/R; Manufacturer: Murata; Manufacturer Lifecycle Status: IN PRODUCTION; Core Material: Ferrite; DC Resistance (DCR): 54mΩ; Number of Circuits: 1; Saturation Current: 3.3A; Shielding: Yes; Supplier: DigiKey; Supplier Part Number: 490-10618-1-ND; Manufacturer Part Number: DFE201612P-1R0M=P2; RoHS: Compliant; Category: Fixed Inductors; Stock: 1675; Pricing: 1=0.21, 10=0.177, 100=0.1454, 1000=0.11957 (USD); Case/Package: 0806; Case Code (Imperial): 0806; Case Code (Metric): 2016; Composition: Wirewound; Current Rating: 2.7A; Depth: 1.6mm; Height: 1.2mm; Height - Seated (Max): 990.6µm; Inductance Tolerance: 20%; Length: 2.0066mm; Lifecycle Status: Production; Max Current Rating: 2.7A; Max DC Current: 2.7A; Max Operating Temperature: 125°C; Min Operating Temperature: -40°C; Mounting Technology: Surface Mount; Number of Terminals: 2; REACH SVHC: Yes; RMS Current (Irms): 2.7A; Schedule B: 8504500000, 8504500000|8504500000|8504500000|8504500000|8504500000; ESR: 54mΩ; Test Frequency: 1MHz; Tolerance: 20%; Width: 1.6mm; ComponentLink1URL: https://datasheet.octopart.com:443/DFE201612P-1R0M%3DP2-Murata-datasheet-99731363.pdf?src-supplier=Farnell; ComponentLink1Description: https://datasheet.octopart.com:443/DFE201612P-1R0M%3DP2-Murata-datasheet-99731363.pdf?src-supplier=Farnell; ComponentLink2URL: https://datasheet.octopart.com:443/DFE201612P-1R0M%3DP2-Murata-datasheet-62290037.pdf?src-supplier=element14+APAC; ComponentLink2Description: https://datasheet.octopart.com:443/DFE201612P-1R0M%3DP2-Murata-datasheet-62290037.pdf?src-supplier=element14+APAC; ComponentLink3URL: https://datasheet.octopart.com:443/DFE201612P-1R0M%3DP2-Murata-datasheet-141261338.pdf?src-supplier=Ciiva; ComponentLink3Description: https://datasheet.octopart.com:443/DFE201612P-1R0M%3DP2-Murata-datasheet-141261338.pdf?src-supplier=Ciiva; ComponentLink4URL: https://datasheet.octopart.com:443/DFE201612P-1R0M%3DP2-Murata-datasheet-140650636.pdf?src-supplier=Ciiva; ComponentLink4Description: https://datasheet.octopart.com:443/DFE201612P-1R0M%3DP2-Murata-datasheet-140650636.pdf?src-supplier=Ciiva; ComponentLink5URL: https://datasheet.octopart.com:443/DFE201612P-1R0M%3DP2-Murata-datasheet-138707451.pdf?src-supplier=Ciiva; ComponentLink5Description: https://datasheet.octopart.com:443/DFE201612P-1R0M%3DP2-Murata-datasheet-138707451.pdf?src-supplier=Ciiva; ComponentLink6URL: https://datasheet.octopart.com:443/DFE201612P-1R0M%3DP2-Murata-datasheet-140568538.pdf?src-supplier=Arrow.cn; ComponentLink6Description: https://datasheet.octopart.com:443/DFE201612P-1R0M%3DP2-Murata-datasheet-140568538.pdf?src-supplier=Arrow.cn; ComponentLink7URL: https://datasheet.octopart.com:443/DFE201612P-1R0M%3DP2-Murata-datasheet-145449059.pdf?src-supplier=Geoflip; ComponentLink7Description: https://datasheet.octopart.com:443/DFE201612P-1R0M%3DP2-Murata-datasheet-145449059.pdf?src-supplier=Geoflip; ComponentLink8URL: http://sigma.octopart.com:80/reach_statement/Murata-company-16.pdf?src-supplier=Compliance+Statements; ComponentLink8Description: http://sigma.octopart.com:80/reach_statement/Murata-company-16.pdf?src-supplier=Compliance+Statements; Supplier 1: DigiKey; Supplier Part Number 1: 490-10618-1-ND; Supplier 2: DigiKey; Supplier Part Number 2: 490-10618-2-ND; Supplier 3: Mouser; Supplier Part Number 3: 81-DFE201612P-1R0MP2
footprint INDC2016X12N (Chip Inductor, 2-Leads, Body 2.00x1.60mm, IPC Medium Density)
pins: 1, 2

## DFE252012F-2R2M=P2
designator L?  Inductance-Nom (L): 2.2uH
General Purpose Inductor, 2.2uH, 20%, 1 Element, Metal Alloy-Core, SMD, 1008; Manufacturer: Murata; DC Resistance (DCR): 82mR; Channels: 1; Max Current Rating: 2.3A; Shape/Size Description: RECTANGULAR PACKAGE; Shielding: Shielded; Test Frequency: 1MHz; Supplier: Mouser; Supplier Part Number: 81-DFE252012F-2R2MP2; Manufacturer Part Number: DFE252012F-2R2M=P2; RoHS: Yes; Category: Fixed Inductors; Stock: 22095; Pricing: 1=0.24, 10=0.2, 50=0.2, 100=0.165, 1000=0.136, 10000=0.111 (USD); Pins: 2; Core Material: Metal; Min Operating Temperature: -40°C; Max Operating Temperature: 125°C; Tolerance: 20%; Inductor Type: GENERAL PURPOSE INDUCTOR; Surface Mount: Yes; Terminal Placement: Dual Ended; Termination: Wraparound; Reach SVHC Compliant: Yes; RoHS Compliant: Yes; ComponentLink1URL: https://psearch.en.murata.com:443/inductor/product/DFE252012F-2R2M_.pdf?src-supplier=IHS+Markit; ComponentLink1Description: https://psearch.en.murata.com:443/inductor/product/DFE252012F-2R2M_.pdf?src-supplier=IHS+Markit; ComponentLink2URL: http://www.farnell.com/datasheets/2616790.pdf?src-supplier=Farnell; ComponentLink2Description: http://www.farnell.com/datasheets/2616790.pdf?src-supplier=Farnell; ComponentLink3URL: https://www.murata.com/~/media/webrenewal/products/inductor/chip/tokoproducts/wirewoundmetalalloychiptype/m_dfe252012f.ashx?src-supplier=Digikey; ComponentLink3Description: https://www.murata.com/~/media/webrenewal/products/inductor/chip/tokoproducts/wirewoundmetalalloychiptype/m_dfe252012f.ashx?src-supplier=Digikey; ComponentLink4URL: https://datasheet.octopart.com/DFE252012F-2R2M%3DP2-Murata-datasheet-117010004.pdf?src-supplier=Future+Electronics; ComponentLink4Description: https://datasheet.octopart.com/DFE252012F-2R2M%3DP2-Murata-datasheet-117010004.pdf?src-supplier=Future+Electronics; ComponentLink5URL: https://datasheet.octopart.com/DFE252012F-2R2M%3DP2-Murata-datasheet-142691300.pdf?src-supplier=Arrow.cn; ComponentLink5Description: https://datasheet.octopart.com/DFE252012F-2R2M%3DP2-Murata-datasheet-142691300.pdf?src-supplier=Arrow.cn; Supplier 1: Digikey; Supplier Part Number 1: 490-13055-1-ND; Supplier 2: Mouser; Supplier Part Number 2: 81-DFE252012F-2R2MP2
footprint INDC2520X12N (Chip Inductor, 2-Leads, Body 2.50x2.00mm, IPC Medium Density)
pins: 1, 2

## DFE252012P-1R0M=P2
designator L?, comment 1uH
General Purpose Inductor, 1uH, 20%, 1 Element, Metal Alloy-Core, SMD, 1008; Manufacturer: Murata; Manufacturer Part Number: DFE252012P-1R0M=P2; Channels: 1; DC Resistance (DCR): 42mR; Max Current Rating: 3.2A; Shape/Size Description: RECTANGULAR PACKAGE; Shielding: Shielded; Test Frequency: 1MHz; Supplier: Mouser; Supplier Part Number: 81-DFE252012P-1R0MP2; RoHS: Yes; Category: Fixed Inductors; Stock: 88021; Pricing: 1=0.2, 10=0.163, 50=0.163, 100=0.139, 1000=0.119, 10000=0.095 (USD); Pins: 2; Core Material: Metal; Min Operating Temperature: -40°C; Max Operating Temperature: 125°C; Tolerance: 20%; Surface Mount: Yes; Inductance-Nom (L): 1uH; Inductor Type: GENERAL PURPOSE INDUCTOR; Terminal Placement: Dual Ended; Termination: Wraparound; RoHS Compliant: Yes; Reach SVHC Compliant: Yes; ComponentLink1URL: https://psearch.en.murata.com:443/inductor/product/DFE252012P-1R0M_.pdf?src-supplier=IHS+Markit; ComponentLink1Description: https://psearch.en.murata.com:443/inductor/product/DFE252012P-1R0M_.pdf?src-supplier=IHS+Markit; ComponentLink2URL: http://www.farnell.com/datasheets/2550134.pdf?src-supplier=Farnell; ComponentLink2Description: http://www.farnell.com/datasheets/2550134.pdf?src-supplier=Farnell; ComponentLink3URL: https://www.murata.com/~/media/webrenewal/products/inductor/chip/tokoproducts/wirewoundmetalalloychiptype/m_dfe252012p.ashx?src-supplier=Digikey; ComponentLink3Description: https://www.murata.com/~/media/webrenewal/products/inductor/chip/tokoproducts/wirewoundmetalalloychiptype/m_dfe252012p.ashx?src-supplier=Digikey; ComponentLink4URL: http://www.murata.com/~/media/webrenewal/products/inductor/chip/tokoproducts/wirewoundmetalalloychiptype/m_dfe252012p.ashx?src-supplier=Digikey; ComponentLink4Description: http://www.murata.com/~/media/webrenewal/products/inductor/chip/tokoproducts/wirewoundmetalalloychiptype/m_dfe252012p.ashx?src-supplier=Digikey; ComponentLink5URL: http://www.toko.co.jp/products/pdf/inductors/dfe252012p.pdf?src-supplier=Avnet; ComponentLink5Description: http://www.toko.co.jp/products/pdf/inductors/dfe252012p.pdf?src-supplier=Avnet; ComponentLink6URL: https://datasheet.octopart.com/DFE252012P-1R0M%3DP2-Murata-datasheet-62290040.pdf?src-supplier=Element14; ComponentLink6Description: https://datasheet.octopart.com/DFE252012P-1R0M%3DP2-Murata-datasheet-62290040.pdf?src-supplier=Element14; ComponentLink7URL: https://datasheet.octopart.com/DFE252012P-1R0M%3DP2-Murata-datasheet-44382719.pdf?src-supplier=Future+Electronics; ComponentLink7Description: https://datasheet.octopart.com/DFE252012P-1R0M%3DP2-Murata-datasheet-44382719.pdf?src-supplier=Future+Electronics; ComponentLink8URL: https://datasheet.octopart.com/DFE252012P-1R0M%3DP2-Murata-datasheet-142295878.pdf?src-supplier=Arrow.cn; ComponentLink8Description: https://datasheet.octopart.com/DFE252012P-1R0M%3DP2-Murata-datasheet-142295878.pdf?src-supplier=Arrow.cn
pins: 1, 2

## DFE322520FD-4R7M=P2
designator L?
General Purpose Inductor, 4.7uH, 20%, 1 Element, Metal Alloy-Core, SMD, 1210; Manufacturer: Murata; Supplier: Mouser; Supplier Part Number: 81-DFE322520FD4R7MP2; Manufacturer Part Number: DFE322520FD-4R7M=P2; RoHS: Yes; Category: Fixed Inductors; Stock: 6855; Pricing: 1=0.87, 10=0.571, 50=0.571, 100=0.475, 1000=0.406, 10000=0.32 (USD); ComponentLink1URL: https://datasheet.ciiva.com:443/pdfs/VipMasterIC/IC/MURE/MURE-S-A0006520090/MURE-S-A0006740961-1.pdf?src-supplier=IHS+Markit; ComponentLink1Description: https://datasheet.ciiva.com:443/pdfs/VipMasterIC/IC/MURE/MURE-S-A0006520090/MURE-S-A0006740961-1.pdf?src-supplier=IHS+Markit
footprint DFE322520F
pins: 1, 2

## DMG6968UDM-7
designator Q?
Small Signal Field-Effect Transistor, 6.5A I(D), 20V, 2-Element, N-Channel, Silicon, Metal-oxide Semiconductor FET; Manufacturer: Diodes; Package Body Material: Plastic; Additional Feature: HIGH RELIABILITY; Drain-source On Resistance-Max: 24mR; Number of Elements: 2; Operating Mode: ENHANCEMENT MODE; Power Dissipation-Max (Abs): 850mW; Time @ Peak Reflow Temperature-Max (s): 40s; Qualification Status: Not Qualified; Supplier: Newark; Supplier Part Number: 28AK8423; Manufacturer Part Number: DMG6968UDM-7; RoHS: Yes; Category: MOSFETs; Stock: 1375; Pricing: 5=0.627, 10=0.5, 25=0.453, 50=0.406, 100=0.359, 250=0.331, 500=0.302, 1000=0.279 (USD); Pins: 6; Package Shape: Rectangular; Terminal Finish: Tin; Transistor Element Material: SILICON; Max Operating Temperature: 150°C; JESD-609 Code: e3; Polarity/Channel Type: N-CHANNEL; Drain Current-Max (Abs) (ID): 6.5A; Drain Current-Max (ID): 6.5A; DS Breakdown Voltage-Min: 20V; FET Technology: METAL-OXIDE SEMICONDUCTOR; JESD-30 Code: R-PDSO-G6; Moisture Sensitivity Level: 1; Package Style: SMALL OUTLINEMeter; Peak Reflow Temperature (Cel): 260°C; Surface Mount: Yes; Terminal Form: Gull Wing; Terminal Position: DUAL; Reach SVHC Compliant: Yes; RoHS Compliant: Yes; ComponentLink1URL: https://datasheet.ciiva.com:443/pdfs/VipMasterIC/IC/DIOD/DIODS21664/DIODS21664-1.pdf?src-supplier=IHS+Markit; ComponentLink1Description: https://datasheet.ciiva.com:443/pdfs/VipMasterIC/IC/DIOD/DIODS21664/DIODS21664-1.pdf?src-supplier=IHS+Markit; ComponentLink2URL: https://datasheet.ciiva.com/11174/ds31758-11174898.pdf?src-supplier=Avnet; ComponentLink2Description: https://datasheet.ciiva.com/11174/ds31758-11174898.pdf?src-supplier=Avnet; ComponentLink3URL: https://datasheet.ciiva.com/929/ds31758-929568.pdf?src-supplier=Digikey; ComponentLink3Description: https://datasheet.ciiva.com/929/ds31758-929568.pdf?src-supplier=Digikey; ComponentLink4URL: https://datasheet.ciiva.com/4443/ds31758-90272-4443012.pdf?src-supplier=Mouser; ComponentLink4Description: https://datasheet.ciiva.com/4443/ds31758-90272-4443012.pdf?src-supplier=Mouser; ComponentLink5URL: https://datasheet.ciiva.com/929/ds31758-929569.pdf?src-supplier=Digikey; ComponentLink5Description: https://datasheet.ciiva.com/929/ds31758-929569.pdf?src-supplier=Digikey
footprint SOT95P275X120-6N (SOT23, 6-Leads, Body 2.90x2.75mm, Pitch 0.95mm, IPC Medium Density)
pins: 1 S1, 2 D1/D2, 3 S2, 4 G2, 5 D1/D2, 6 G1

## DMP2004K-7
designator Q?
MOSFET P-CH 20V 600MA SOT23-3; Manufacturer: Diodes Inc.; Max Junction Temp: +150°C; Turn On Delay Time: 8.5ns; Gate To Source Voltage: 8V; Input Capacitace At Vds: 175pF @ -16V; Rthja Max: 227°C/W; Drain To Source Resistance: 1.1Ω; Turn Off Delay Time: 20.2ns; Standoff Height: 0.013mm; Drain To Source Breakdown Voltage: -20V; Number Of P Channels: 1; Power Dissipation: 550mW; Pulse Drain Current: -1.9A; Depletion Mode: False; Max Forward Diode Voltage: -1.2V; Threshold Vgs Min: -0.5V; Threshold Vgs Max: -1V; Continuous Drain Current: -600mA; Manufacturer Part Number: DMP2004K-7; Height: 1.1mm; ComponentLink2Description: Datasheet; ComponentLink2URL: https://www.diodes.com/assets/Datasheets/ds30933.pdf; Package: SOT23; Footprint Url: https://www.diodes.com/assets/Package-Files/SOT23.pdf; Lead Free: Yes; Octopart: https://octopart.com/dmp2004k-7-diodes+inc.-7151877; Digikey Description: MOSFET P-CH 20V 600MA SOT23-3; Device Class L1: Discrete Semiconductors; Drain To Source Voltage: -20V; Mouser Description: MOSFET P-Channel; Number Of Channels: 1; Device Class L3: MOSFETs; Temperature: -55°C to +150°C; Category: Trans; Device Class L2: Transistors; Automotive: No; Temperature Range High: +150°C; RoHS: TRUE; Temperature Range Low: -55°C; Supplier 1: Digikey; Supplier Part Number 1: DMP2004KDIDKR-ND; Supplier 2: Mouser; Supplier Part Number 2: 621-DMP2004K-7
footprint SOT100P240X110-3N (SOT23, 3-Leads, Body 2.90x2.40mm, Pitch 1.00mm, IPC Medium Density)
pins: 1 G, 2 S, 3 D

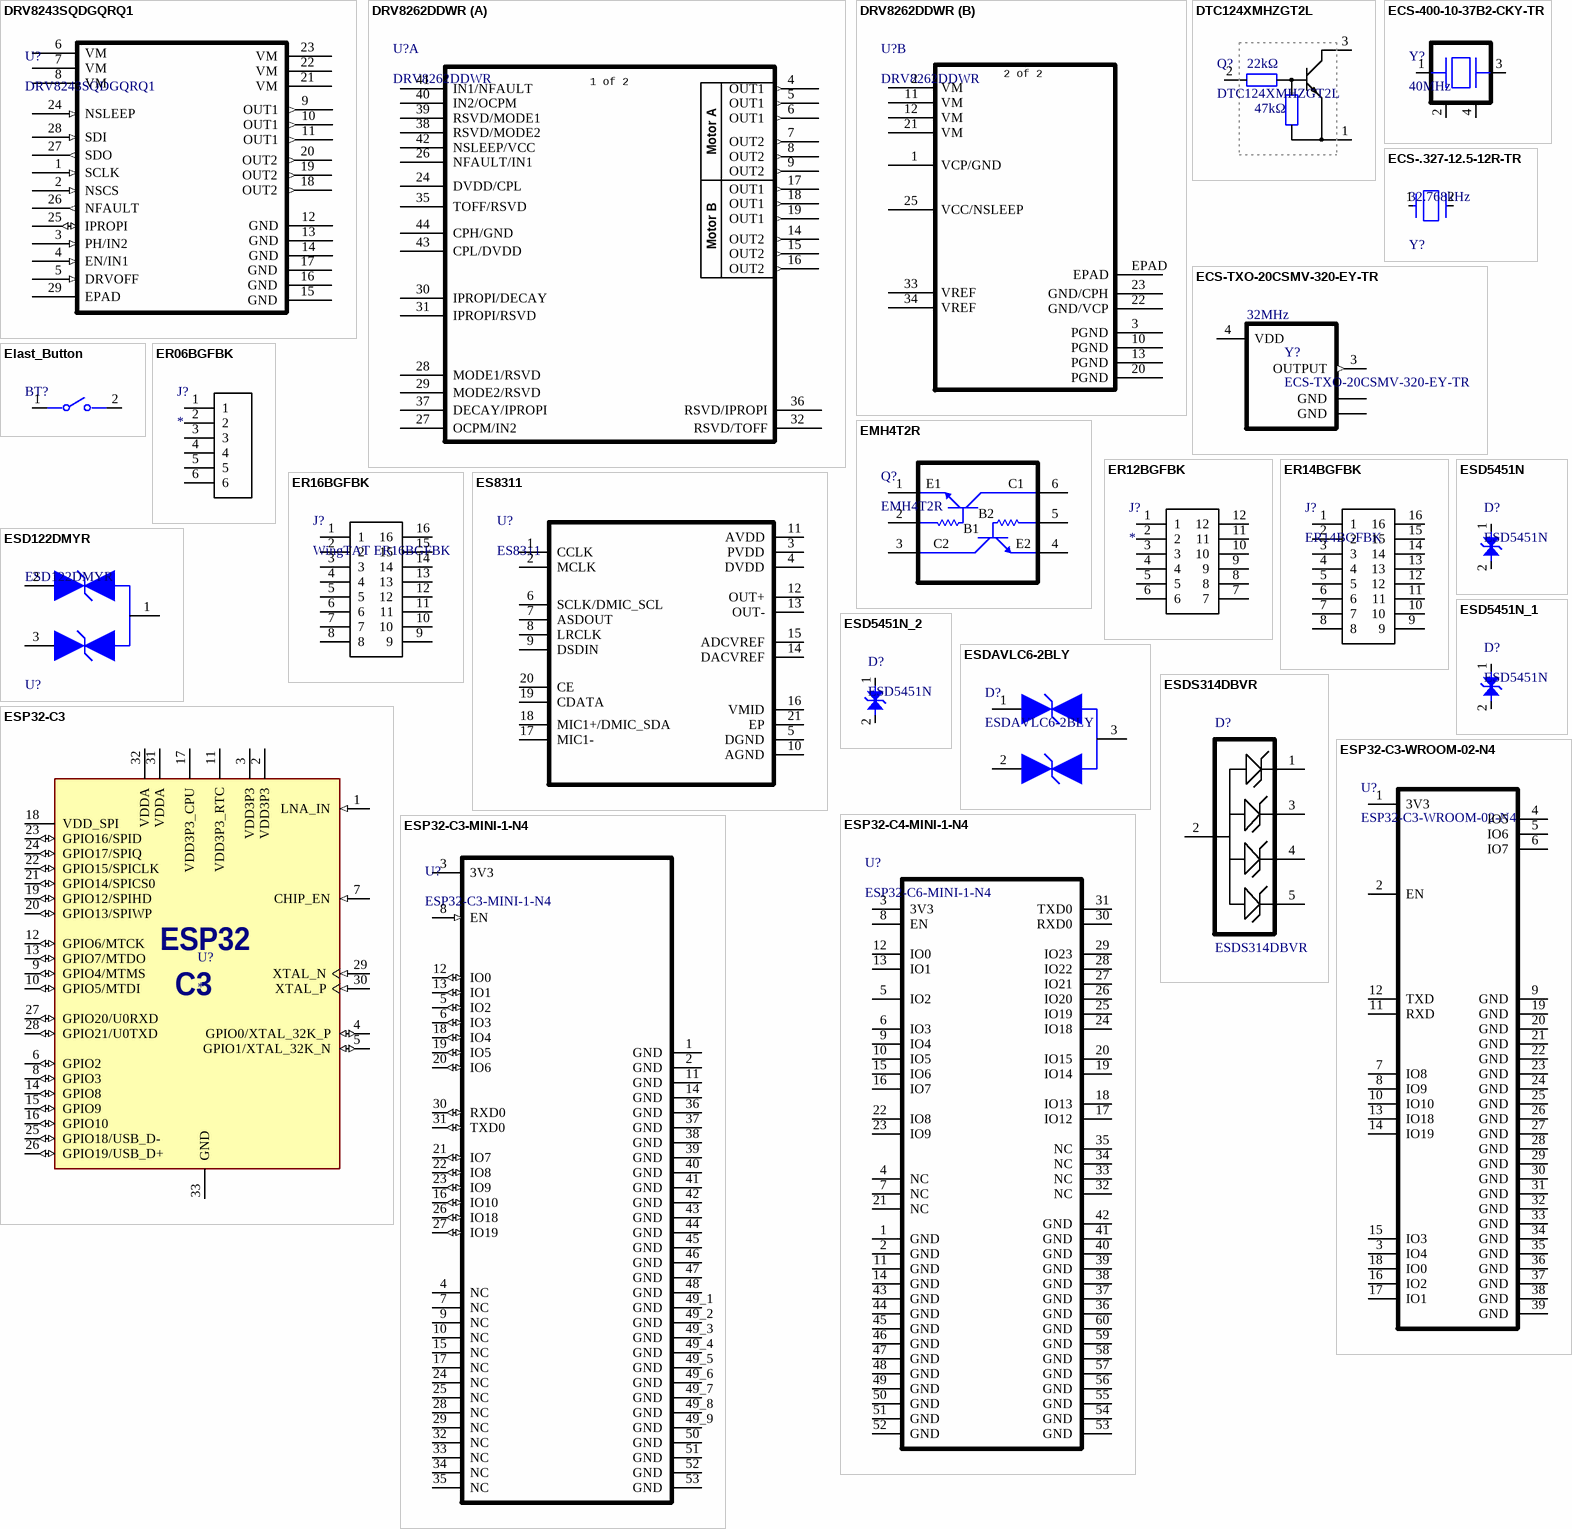
[diagram p4: symbols DRV8243SQDGQRQ1 to ESP32-C4-MINI-1-N4]

## DRV8243SQDGQRQ1
designator U?
Automotive 40-V, 12-A H-bridge driver with integrated current sensing and feedback 28-HVSSOP -40 to 125; Manufacturer_Name: Texas Instruments; Type: Power Management; Copyright: Copyright (C) 2025 Ultra Librarian. All rights reserved.; Manufacturer_Part_Number: DRV8243SQDGQRQ1; RefDes: RefDes
footprint VSSOP28_DGQ_TEX
pins: 1 SCLK (in), 2 NSCS (in), 3 PH/IN2 (in), 4 EN/IN1 (in), 5 DRVOFF (in), 6 VM (power), 7 VM (power), 8 VM (power), 9 OUT1 (out), 10 OUT1 (out), 11 OUT1 (out), 12 GND (power), 13 GND (power), 14 GND (power), 15 GND (power), 16 GND (power), 17 GND (power), 18 OUT2 (out), 19 OUT2 (out), 20 OUT2 (out), 21 VM (power), 22 VM (power), 23 VM (power), 24 NSLEEP (in), 25 IPROPI (io), 26 NFAULT (out), 27 SDO (out), 28 SDI (in), 29 EPAD (power)

## DRV8262DDWR
designator U?
65-V single or dual H-bridge motor driver with integrated current sense and regulation 44-HTSSOP -40 to 125; Manufacturer_Name: Texas Instruments; Type: Power Management; Copyright: Copyright (C) 2026 Ultra Librarian. All rights reserved.; Manufacturer_Part_Number: DRV8262DDWR; RefDes: RefDes
footprint HTSSOP44-DDW_TEX
part A pins: 4 OUT1 (out), 5 OUT1 (out), 6 OUT1 (out), 7 OUT2 (out), 8 OUT2 (out), 9 OUT2 (out), 14 OUT2 (out), 15 OUT2 (out), 16 OUT2 (out), 17 OUT1 (out), 18 OUT1 (out), 19 OUT1 (out), 24 DVDD/CPL, 26 NFAULT/IN1, 27 OCPM/IN2, 28 MODE1/RSVD, 29 MODE2/RSVD, 30 IPROPI/DECAY, 31 IPROPI/RSVD, 32 RSVD/TOFF, 35 TOFF/RSVD, 36 RSVD/IPROPI, 37 DECAY/IPROPI, 38 RSVD/MODE2, 39 RSVD/MODE1, 40 IN2/OCPM, 41 IN1/NFAULT, 42 NSLEEP/VCC, 43 CPL/DVDD, 44 CPH/GND
part B pins: 1 VCP/GND, 2 VM, 3 PGND (power), 10 PGND (power), 11 VM, 12 VM, 13 PGND (power), 20 PGND (power), 21 VM, 22 GND/VCP, 23 GND/CPH, 25 VCC/NSLEEP, 33 VREF (power), 34 VREF (power), EPAD (power)
part A text: 1 of 2; Motor A; Motor B
part B text: 2 of 2

## DTC124XMHZGT2L
designator Q?
Transistor RET NPN; Manufacturer_Name: ROHM Semiconductor; Datasheet Link: https://fscdn.rohm.com/en/products/databook/datasheet/discrete/transistor/digital/dtc124xmhzgt2l-e.pdf; Manufacturer Part Number: DTC124XMHZGT2L; Arrow Part Number: DTC124XMHZGT2L; Arrow Price/Stock: https://br.mouser.com/ProductDetail/ROHM-Semiconductor/DTC124XMHZGT2L?qs=4dK74SdgGtw%2FZRtY5HbFiQ%3D%3D
footprint SOT723
pins: 1 E, 2 B, 3 C
text: 22kΩ; 47kΩ

## ECS-400-10-37B2-CKY-TR
designator Y?, comment 40MHz
Crystal 40MHz 10pF 4-Pin SMD ECX-1637B2 T/R; Manufacturer: ECS International; Manufacturer Part Number: ECS-400-10-37B2-CKY-TR; Supplier: Mouser; Supplier Part Number: 520-400-10-37B2CKYTR; RoHS: No; Stock: 8102; Pricing: 1=0.38, 10=0.325, 50=0.294, 100=0.285, 1000=0.249, 10000=0.21 (USD); ComponentLink1URL: https://datasheet.octopart.com/ECS-400-10-37B2-CKY-TR-ECS-International-datasheet-163707945.pdf?src-supplier=Master+Electronics; ComponentLink1Description: https://datasheet.octopart.com/ECS-400-10-37B2-CKY-TR-ECS-International-datasheet-163707945.pdf?src-supplier=Master+Electronics
footprint ECX-1637B2_ECS
pins: 1, 2, 3, 4

## ECS-.327-12.5-12R-TR
designator Y?, comment 32.768kHz
Parallel - Fundamental Quartz Crystal, 0.032768MHz Nom; Manufacturer: ECS International; Manufacturer Part Number: ECS-.327-12.5-12R-TR; Frequency Tolerance: 20ppm; ESR (Equivalent Series Resistance): 70kR; Load Capacitance: 12.5pF; Min Operating Temperature: -40°C; Case/Package: SMD/SMT; Mount: Surface Mount; Packaging: Cut Tape; Max Operating Temperature: 85°C; Frequency: 32.768kHz; Supplier: Avnet; Supplier Part Number: ECS-.327-12.5-12R-TR; RoHS: Yes; Category: Crystals; Stock: 3000; Pricing: 3000=0.42857, 6000=0.40541, 12000=0.36842, 18000=0.35897, 24000=0.325 (USD); ComponentLink1URL: https://datasheet.ciiva.com:443/pdfs/VipMasterIC/IC/ECSI/ECSI-S-A0009735880/ECSI-S-A0009735939-1.pdf?src-supplier=IHS+Markit; ComponentLink1Description: https://datasheet.ciiva.com:443/pdfs/VipMasterIC/IC/ECSI/ECSI-S-A0009735880/ECSI-S-A0009735939-1.pdf?src-supplier=IHS+Markit; ComponentLink2URL: https://www.ecsxtal.com/store/pdf/ECX-12R.pdf?src-supplier=Digikey; ComponentLink2Description: https://www.ecsxtal.com/store/pdf/ECX-12R.pdf?src-supplier=Digikey; ComponentLink3URL: https://datasheet.octopart.com/ECS-.327-12.5-12R-TR-ECS-International-datasheet-104167379.pdf?src-supplier=Master+Electronics; ComponentLink3Description: https://datasheet.octopart.com/ECS-.327-12.5-12R-TR-ECS-International-datasheet-104167379.pdf?src-supplier=Master+Electronics
footprint ECX-.327-12R
pins: 1 In/Out, 2 Out/In

## ECS-TXO-20CSMV-320-EY-TR
designator Y?  Frequency: 32MHz
TCXO, Oscillator, 32 MHz, 2.5 ppm, SMD, 2mm x 1.6mm, Clipped Sinewave, 3.3 V, ECS-TXO-20CSMV; Manufacturer: ECS International; Body Material: Ceramic; Frequency Stability: 2.5ppm; Max Supply Current: 2.5mA; Max Supply Voltage: 3.465V; Min Supply Voltage: 1.7V; Supplier: DigiKey; Supplier Part Number: 50-ECS-TXO-20CSMV-320-EY-CT-ND; Manufacturer Part Number: ECS-TXO-20CSMV-320-EY-TR; RoHS: Compliant; Category: Controlled Oscillators; Stock: 80577; Pricing: 1=1.83, 10=1.593, 25=1.5064, 50=1.4442, 100=1.3844, 250=1.30924, 500=1.25512 (USD); Lifecycle Status: Production; Max Operating Temperature: 85°C; Min Operating Temperature: -30°C; Mounting Technology: Surface Mount; Number of Terminals: 4; REACH SVHC: Yes; Schedule B: 8542310000; ComponentLink1URL: https://datasheet.octopart.com:443/ECS-TXO-20CSMV-320-EY-TR-ECS-International-datasheet-179231063.pdf?src-supplier=IHS; ComponentLink1Description: https://datasheet.octopart.com:443/ECS-TXO-20CSMV-320-EY-TR-ECS-International-datasheet-179231063.pdf?src-supplier=IHS; ComponentLink2URL: https://datasheet.octopart.com:443/ECS-TXO-20CSMV-320-EY-TR-ECS-International-datasheet-164298200.pdf?src-supplier=Future+Electronics; ComponentLink2Description: https://datasheet.octopart.com:443/ECS-TXO-20CSMV-320-EY-TR-ECS-International-datasheet-164298200.pdf?src-supplier=Future+Electronics; Supplier 1: DigiKey; Supplier Part Number 1: 50-ECS-TXO-20CSMV-320-EY-CT-ND; Supplier 2: DigiKey; Supplier Part Number 2: 50-ECS-TXO-20CSMV-320-EY-TR-ND; Supplier 3: Mouser; Supplier Part Number 3: 520-TXO20CSMV320EYTR
footprint OSC_ECSTXO20CSMV320EYTR
pins: 1 GND (power), 2 GND (power), 3 OUTPUT (out), 4 VDD (power)

## Elast_Button
designator BT?, comment Elast_But  (value not drawn)
Elastomer Button of
footprint Elast_Button
pins: 1, 2